# Altium footprint library RN1103TE85L,F.PcbLib: 3 footprints
Each footprint in its own frame and in the unit in brackets; x right, y up, seen from the top. Pads: shape width x height; smd on the part's side, far side on the other; paste and mask are expansions set on the pad; w line width, h text height; cw(c..) or ccw(c..) is an arc to the next point about the centre after c.
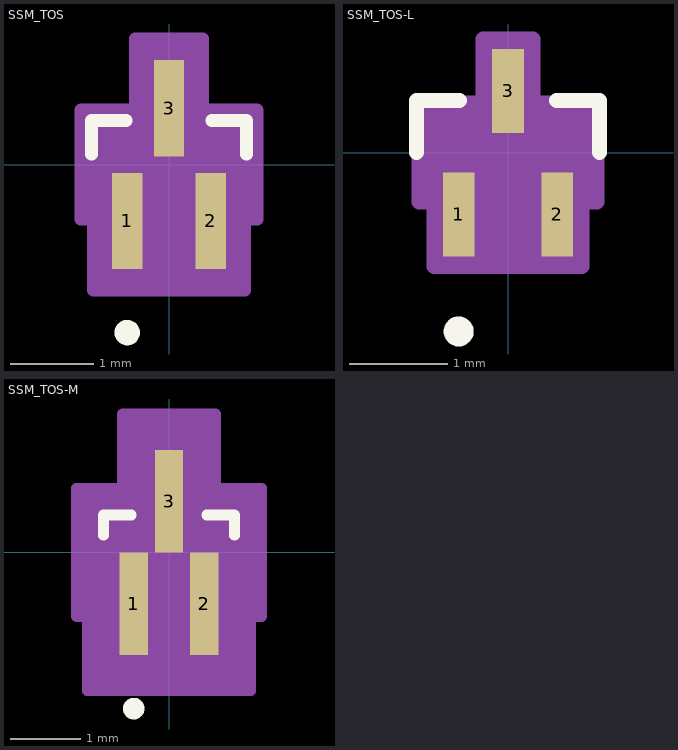
[diagram p0: the footprints below, top view; thin cyan lines are the x and y axes]

## SSM_TOS [mm]
pads (3):
  rect 0.36x1.15 smd paste+0 mask+0: 1(-0.5,-0.675) 2(0.5,-0.675) 3(0,0.675)
Top Overlay:
  circle w0.152: c-0.5,-2.012 r0.076
  lines w0.152: -0.927,0.123 -0.927,0.527 -0.513,0.527 ; 0.513,0.527 0.927,0.527 0.927,0.123
  text ".Designator" at -3.492,-0.635 h1.27
Mechanical 13:
  circle w0.025: c-0.5,-0.146 r0.076
  lines w0.025: -0.8,-0.4 0.8,-0.4 0.8,0.4 -0.8,0.4 -0.8,-0.4 ; -0.65,-0.9 -0.65,-0.4 -0.35,-0.4 -0.35,-0.9 -0.65,-0.9 ; -0.15,0.4 0.15,0.4 0.15,0.9 -0.15,0.9 -0.15,0.4 ; 0.35,-0.9 0.35,-0.4 0.65,-0.4 0.65,-0.9 0.35,-0.9
  text ".Designator" at -3.492,-0.635 h1.27
Mechanical 15:
  region: -1.054,-0.654 -1.054,0.654 -0.404,0.654 -0.404,1.504 0.404,1.504 0.404,0.654 1.054,0.654 1.054,-0.654 0.904,-0.654 0.904,-1.504 -0.904,-1.504 -0.904,-0.654
  lines w0.152: -1.054,-0.654 -1.054,0.654 -0.404,0.654 -0.404,1.504 0.404,1.504 0.404,0.654 1.054,0.654 1.054,-0.654 0.904,-0.654 0.904,-1.504 -0.904,-1.504 -0.904,-0.654 -1.054,-0.654
3D body "SSM_TOS.step": height 0.8, standoff 0, extent -0.8,-0.9 0.8,0.9

## SSM_TOS-L [mm]
pads (3):
  rect 0.32x0.85 smd paste+0 mask+0: 1(-0.5,-0.625) 2(0.5,-0.625) 3(0,0.625)
Top Overlay:
  circle w0.152: c-0.5,-1.812 r0.076
  lines w0.152: -0.927,0 -0.927,0.527 -0.493,0.527 ; 0.493,0.527 0.927,0.527 0.927,0
  text ".Designator" at -3.492,-0.635 h1.27
Mechanical 13:
  circle w0.025: c-0.5,-0.146 r0.076
  lines w0.025: -0.8,-0.4 0.8,-0.4 0.8,0.4 -0.8,0.4 -0.8,-0.4 ; -0.65,-0.9 -0.65,-0.4 -0.35,-0.4 -0.35,-0.9 -0.65,-0.9 ; -0.15,0.4 0.15,0.4 0.15,0.9 -0.15,0.9 -0.15,0.4 ; 0.35,-0.9 0.35,-0.4 0.65,-0.4 0.65,-0.9 0.35,-0.9
  text ".Designator" at -3.492,-0.635 h1.27
Mechanical 15:
  region: -0.902,-0.502 -0.902,0.502 -0.252,0.502 -0.252,1.152 0.252,1.152 0.252,0.502 0.902,0.502 0.902,-0.502 0.752,-0.502 0.752,-1.152 -0.752,-1.152 -0.752,-0.502
  lines w0.152: -0.902,-0.502 -0.902,0.502 -0.252,0.502 -0.252,1.152 0.252,1.152 0.252,0.502 0.902,0.502 0.902,-0.502 0.752,-0.502 0.752,-1.152 -0.752,-1.152 -0.752,-0.502 -0.902,-0.502
3D body "SSM_TOS.step": height 0.8, standoff 0, extent -0.8,-0.9 0.8,0.9

## SSM_TOS-M [mm]
pads (3):
  rect 0.4x1.45 smd paste+0 mask+0: 1(-0.5,-0.725) 2(0.5,-0.725) 3(0,0.725)
Top Overlay:
  circle w0.152: c-0.5,-2.212 r0.076
  lines w0.152: -0.927,0.243 -0.927,0.527 -0.533,0.527 ; 0.533,0.527 0.927,0.527 0.927,0.243
  text ".Designator" at -3.492,-0.635 h1.27
Mechanical 13:
  circle w0.025: c-0.5,-0.146 r0.076
  lines w0.025: -0.8,-0.4 0.8,-0.4 0.8,0.4 -0.8,0.4 -0.8,-0.4 ; -0.65,-0.9 -0.65,-0.4 -0.35,-0.4 -0.35,-0.9 -0.65,-0.9 ; -0.15,0.4 0.15,0.4 0.15,0.9 -0.15,0.9 -0.15,0.4 ; 0.35,-0.9 0.35,-0.4 0.65,-0.4 0.65,-0.9 0.35,-0.9
  text ".Designator" at -3.492,-0.635 h1.27
Mechanical 15:
  region: -1.308,-0.908 -1.308,0.908 -0.658,0.908 -0.658,1.958 0.658,1.958 0.658,0.908 1.308,0.908 1.308,-0.908 1.158,-0.908 1.158,-1.958 -1.158,-1.958 -1.158,-0.908
  lines w0.152: -1.308,-0.908 -1.308,0.908 -0.658,0.908 -0.658,1.958 0.658,1.958 0.658,0.908 1.308,0.908 1.308,-0.908 1.158,-0.908 1.158,-1.958 -1.158,-1.958 -1.158,-0.908 -1.308,-0.908
3D body "SSM_TOS.step": height 0.8, standoff 0, extent -0.8,-0.9 0.8,0.9